# EAGLE library part 6213XX21821_62131021821 (library WR-PHD)
WR-PHD 2.00 mm Dual SMT Socket Header Low Profile Bottom Entry Article Properties Pins 4 unitless; 6 unitless; 8 unitless; 10 unitless; 14 unitless; 16 unitless; 20 unitless; 24 unitless General Information Operating Temperature -40 °C up to +105 °C Compliance Lead free / RoHS Pitch 2 mm Durability 50 Cycles Rows Dual Gender Socket Header Type Straight Material Properties Insulator Material PA9T Insulator Flammability Rating UL94 V-0 Contact Material Copper Alloy Contact Plating Gold Contact Type Stamped Certification UL Approval E323964 Packaging Properties Packaging Tape and Reel with Cap; Tube Electrical Properties IR 2 A Withstanding Voltage 500 V (AC) Contact Resistance 20 mΩ RISO 1000 MΩ <https://www.we-online.com/components/media/o33222v209%20Family_WR-PHD_621xxx21821.jpg> Details see: www.we-online.com/en/components/products/PHD_2_0_SMT_DUAL_SOCKET_HEADER_LOW_PROFILE_6210XX21821 <www.we-online.com/catalog/PHD_2_0_SMT_DUAL_SOCKET_HEADER_LOW_PROFILE_6210XX21821/?utm_source=eagle_model&utm_medium=description_link&utm_campaign=eisos_eagle> Updated by Ella 2024-01-31 2024 (C) Würth Elektronik
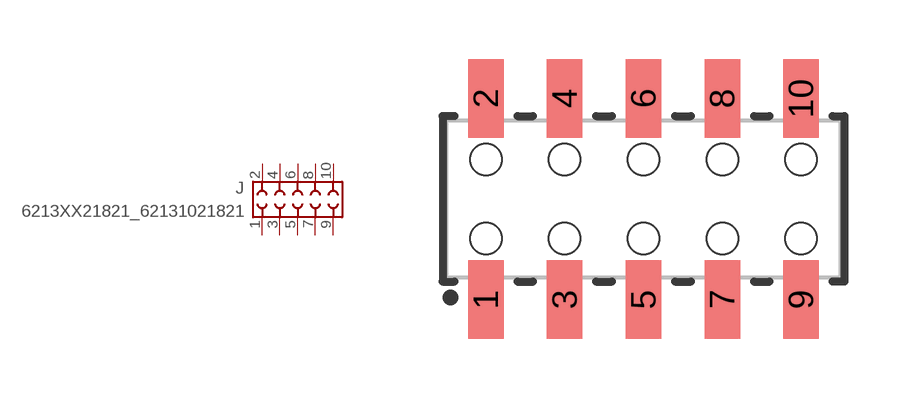
[diagram p374: symbol with the pads of 62131021821; footprint 62131021821]

Designator prefix J

## 6213XX21821_62131021821 (DATASHEET-URL: https://www.we-online.com/redexpert/spec/62131021821?ae; GENDER: Socket Header; IR: 2A; MOUNT: SMT; PACKAGING: Tape and Reel with Cap; PART-NUMBER: 62131021821; PINS: 10; PITCH: 2.00 mm; ROWS: Dual; TYPE: Straight; VALUE: 62131021821)  [62131021821]
1  1  pas
2  2  pas
3  3  pas
4  4  pas
5  5  pas
6  6  pas
7  7  pas
8  8  pas
9  9  pas
10  10  pas

## Footprint 62131021821 (pad centres in mm)
WR-PHD 2.00 mm Dual SMT Socket Header Low Profile (Reel),10 Pins
smd 0.9 x 2: 1 -4,-2.55; 2 -4,2.55; 3 -2,-2.55; 4 -2,2.55; 5 0,-2.55; 6 0,2.55; 7 2,-2.55; 8 2,2.55; 9 4,-2.55; 10 4,2.55
hole 0.8 at -4,1
hole 0.8 at -4,-1
hole 0.8 at -2,1
hole 0.8 at -2,-1
hole 0.8 at 0,-1
hole 0.8 at 0,1
hole 0.8 at 2,1
hole 0.8 at 2,-1
hole 0.8 at 4,1
hole 0.8 at 4,-1